# Altium footprint library SamacSys.PcbLib: 1008 footprints (part 14 of 63)
Each footprint in its own frame and in the unit in brackets; x right, y up, seen from the top. Pads: shape width x height; smd on the part's side, far side on the other; paste and mask are expansions set on the pad; w line width, h text height; cw(c..) or ccw(c..) is an arc to the next point about the centre after c.
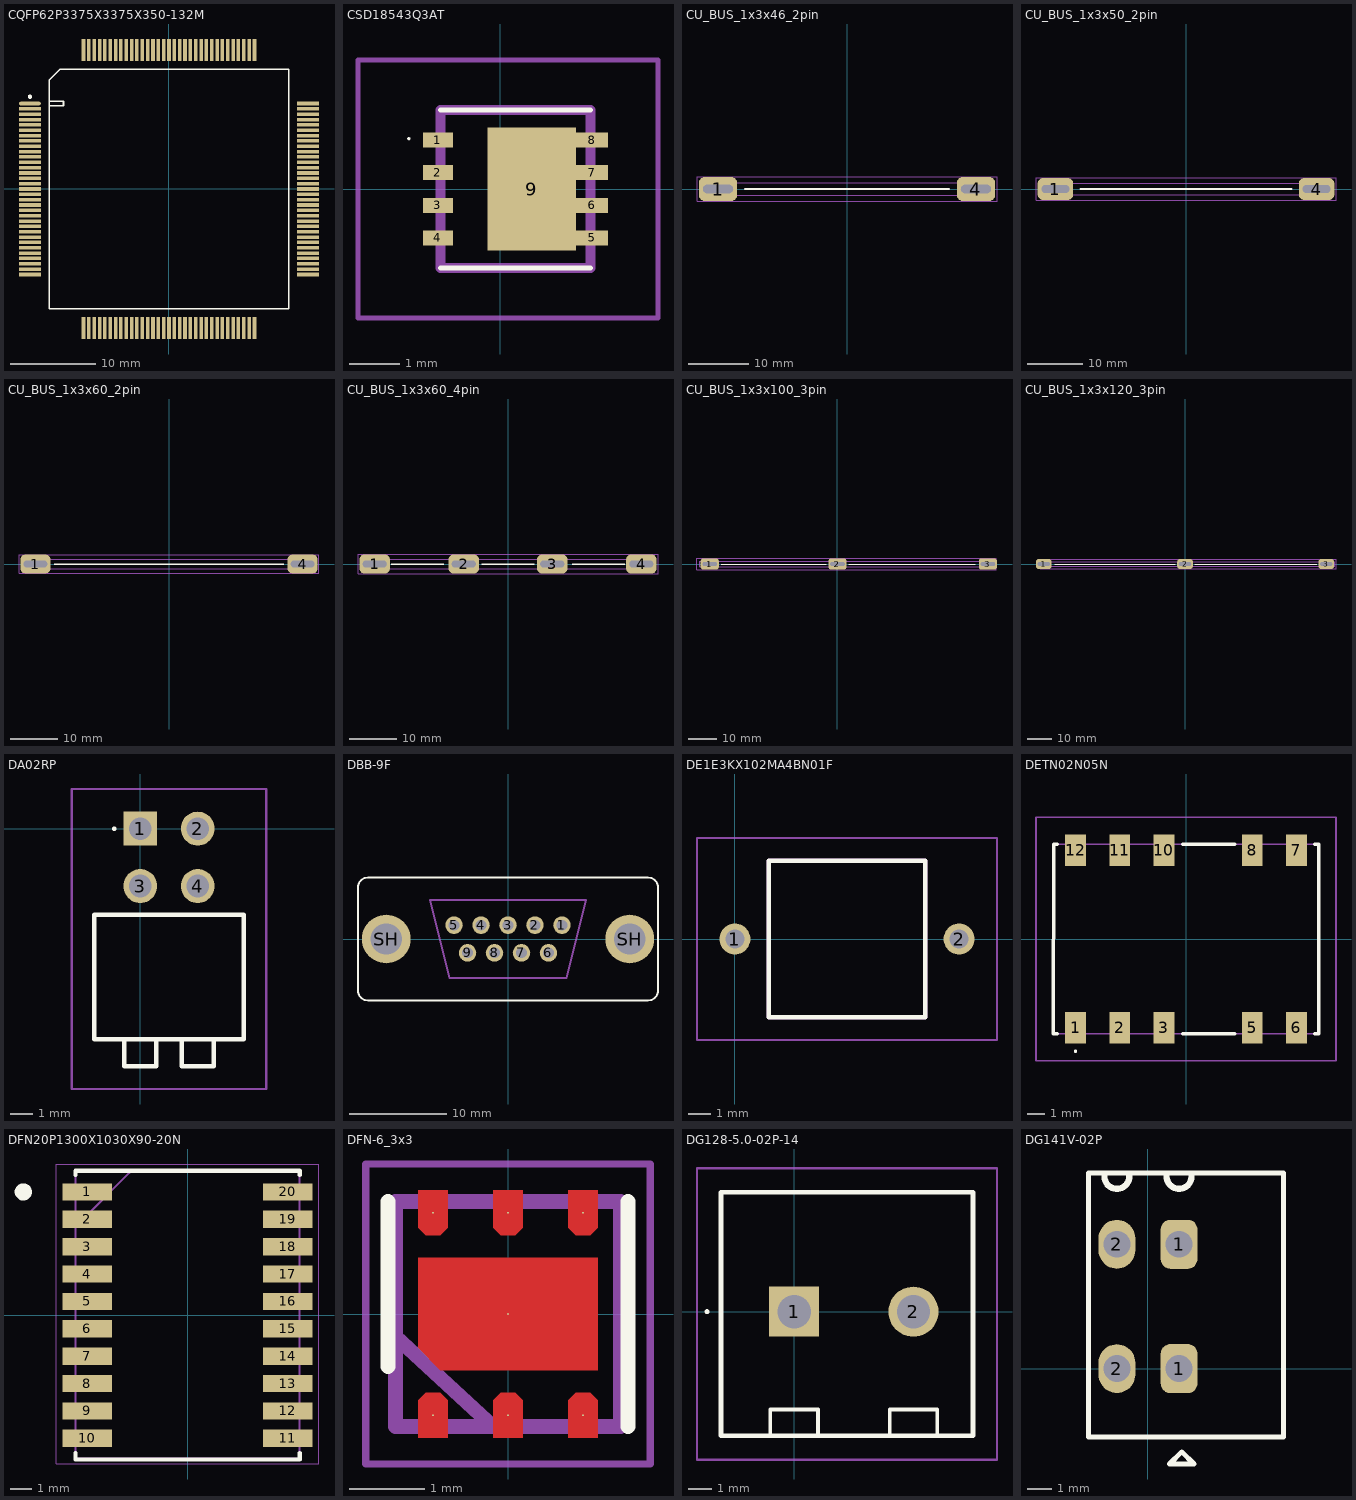
[diagram p13: the footprints below, top view; thin cyan lines are the x and y axes]

## CQFP62P3375X3375X350-132M [mm] "CQFP, 132-Leads, Body 33,75x33,75mm, Pitch 0,63mm, IPC Low Density"
height 3.5
pads (132):
  oval 2.55x0.42 smd: 1(-16.275,10)
  rect 2.55x0.42 smd: 2(-16.275,9.375) 3(-16.275,8.75) 4(-16.275,8.125) 5(-16.275,7.5) 6(-16.275,6.875) 7(-16.275,6.25) 8(-16.275,5.625) 9(-16.275,5) 10(-16.275,4.375) 11(-16.275,3.75) 12(-16.275,3.125) 13(-16.275,2.5) 14(-16.275,1.875) 15(-16.275,1.25) 16(-16.275,0.625) 17(-16.275,0) 18(-16.275,-0.625) 19(-16.275,-1.25) 20(-16.275,-1.875) 21(-16.275,-2.5) 22(-16.275,-3.125) 23(-16.275,-3.75) 24(-16.275,-4.375) 25(-16.275,-5) 26(-16.275,-5.625) 27(-16.275,-6.25) 28(-16.275,-6.875) 29(-16.275,-7.5) 30(-16.275,-8.125) 31(-16.275,-8.75) 32(-16.275,-9.375) 33(-16.275,-10) 67(16.275,-10) 68(16.275,-9.375) 69(16.275,-8.75) 70(16.275,-8.125) 71(16.275,-7.5) 72(16.275,-6.875) 73(16.275,-6.25) 74(16.275,-5.625) 75(16.275,-5) 76(16.275,-4.375) 77(16.275,-3.75) 78(16.275,-3.125) 79(16.275,-2.5) 80(16.275,-1.875) 81(16.275,-1.25) 82(16.275,-0.625) 83(16.275,0) 84(16.275,0.625) 85(16.275,1.25) 86(16.275,1.875) 87(16.275,2.5) 88(16.275,3.125) 89(16.275,3.75) 90(16.275,4.375) 91(16.275,5) 92(16.275,5.625) 93(16.275,6.25) 94(16.275,6.875) 95(16.275,7.5) 96(16.275,8.125) 97(16.275,8.75) 98(16.275,9.375) 99(16.275,10)
  rect 0.42x2.55 smd: 34(-10,-16.275) 35(-9.375,-16.275) 36(-8.75,-16.275) 37(-8.125,-16.275) 38(-7.5,-16.275) 39(-6.875,-16.275) 40(-6.25,-16.275) 41(-5.625,-16.275) 42(-5,-16.275) 43(-4.375,-16.275) 44(-3.75,-16.275) 45(-3.125,-16.275) 46(-2.5,-16.275) 47(-1.875,-16.275) 48(-1.25,-16.275) 49(-0.625,-16.275) 50(0,-16.275) 51(0.625,-16.275) 52(1.25,-16.275) 53(1.875,-16.275) 54(2.5,-16.275) 55(3.125,-16.275) 56(3.75,-16.275) 57(4.375,-16.275) 58(5,-16.275) 59(5.625,-16.275) 60(6.25,-16.275) 61(6.875,-16.275) 62(7.5,-16.275) 63(8.125,-16.275) 64(8.75,-16.275) 65(9.375,-16.275) 66(10,-16.275) 100(10,16.275) 101(9.375,16.275) 102(8.75,16.275) 103(8.125,16.275) 104(7.5,16.275) 105(6.875,16.275) 106(6.25,16.275) 107(5.625,16.275) 108(5,16.275) 109(4.375,16.275) 110(3.75,16.275) 111(3.125,16.275) 112(2.5,16.275) 113(1.875,16.275) 114(1.25,16.275) 115(0.625,16.275) 116(0,16.275) 117(-0.625,16.275) 118(-1.25,16.275) 119(-1.875,16.275) 120(-2.5,16.275) 121(-3.125,16.275) 122(-3.75,16.275) 123(-4.375,16.275) 124(-5,16.275) 125(-5.625,16.275) 126(-6.25,16.275) 127(-6.875,16.275) 128(-7.5,16.275) 129(-8.125,16.275) 130(-8.75,16.275) 131(-9.375,16.275) 132(-10,16.275)
Top Overlay:
  circle w0.25: c-16.275,10.8 r0.125
  lines w0.2: -14,9.75 -12.35,9.75 -12.35,10.25 -14,10.25 ; -14,-14 -14,12.75 -12.75,14 14,14 14,-14 -14,-14
3D body "Миландр. STEP-модель для корпуса 4229.132-3 формованный.STEP": height 3.55, standoff -0.1, extent -17.1,-17.1 17.1,17.1

## CSD18543Q3AT [mm]
pads (9):
  rect 0.6x0.3 smd: 1(-1.243,0.975) 2(-1.243,0.325) 3(-1.243,-0.325) 4(-1.243,-0.975)
  rect 0.635x0.3 smd: 5(1.839,-0.975) 6(1.839,-0.325) 7(1.839,0.325) 8(1.839,0.975)
  rect 1.775x2.45 smd: 9(0.634,0)
Top Overlay:
  lines w0.032: -1.839,1.006 cw(c-1.823,1.006) -1.807,1.006 cw(c-1.823,1.006) -1.839,1.006
  lines w0.1: -1.193,-1.575 1.807,-1.575 ; -1.193,1.575 1.807,1.575
Assembly:
  lines w0.2: -1.193,-1.575 -1.193,1.575 1.807,1.575 1.807,-1.575 -1.193,-1.575
Countryard:
  lines w0.1: -2.839,-2.575 -2.839,2.575 3.157,2.575 3.157,-2.575 -2.839,-2.575
3D body "CSD18543Q3AT.stp": height 1, standoff 0, extent -1.513,-1.575 2.127,1.575

## CU_BUS_1x3x46_2pin [mm] "Copper bus 1x3x46mm 2pin"
height 4
pads (2):
  rrect50% 6.4x4 hole 1.4 slot 5 at 0 deg: 1(-21.5,0) 4(21.5,0)
Top Overlay:
  lines w0.3: -17,0 17,0
Assembly:
  lines w0.1: -23,-1 23,-1 23,1 -23,1 -23,-1
Countryard:
  lines w0.1: -25,-2 25,-2 25,2 -25,2 -25,-2
3D body "bus_1x3x49_high_2pin.STEP": height 9.1, standoff -1.9, extent -24.5,-0.5 24.5,0.5

## CU_BUS_1x3x50_2pin [mm] "Copper bus 1x3x50mm 2pin"
height 4
pads (2):
  rrect50% 6.4x4 hole 1.4 slot 5 at 0 deg: 1(-23.5,0) 4(23.5,0)
Top Overlay:
  lines w0.3: -19,0 19,0
Assembly:
  lines w0.1: -25,-1 25,-1 25,1 -25,1 -25,-1
Countryard:
  lines w0.1: -27,-2 27,-2 27,2 -27,2 -27,-2

## CU_BUS_1x3x60_2pin [mm] "Copper bus 1x3x60mm 2pin"
height 4
pads (2):
  rrect50% 6.4x4 hole 1.4 slot 5 at 0 deg: 1(-28.5,0) 4(28.5,0)
Top Overlay:
  lines w0.3: -24.5,0 24.5,0
Assembly:
  lines w0.1: -30.5,-1 -30.5,1 31,1 31,-1 -30.5,-1
Countryard:
  lines w0.1: -32,-2 32,-2 32,2 -32,2 -32,-2
3D body "bus_1x3x60_2pin.STEP": height 3.5, standoff -1.5, extent -30.5,-0.5 30.5,0.5

## CU_BUS_1x3x60_4pin [mm] "Copper bus 1x60mm, 4 pin"
height 4
pads (4):
  rrect50% 6.4x4 hole 1.4 slot 5 at 0 deg: 1(-28,0) 2(-9.3,0) 3(9.3,0) 4(28,0)
Top Overlay:
  lines w0.3: -24.5,0 -13.5,0 ; -5.5,0 5.5,0 ; 13.5,0 24.5,0
Assembly:
  lines w0.1: -30.5,-1 -30.5,1 31,1 31,-1 -30.5,-1
Countryard:
  lines w0.1: -31.5,-2 31.5,-2 31.5,2 -31.5,2 -31.5,-2
3D body "bus_1x3x60_4pin.STEP": height 3.5, standoff -1.5, extent -30,-0.5 30,0.5

## CU_BUS_1x3x100_3pin [mm] "Copper bus 1x100mm, 3 pin"
height 4
pads (3):
  rrect50% 6.4x4 hole 1.4 slot 5 at 0 deg: 1(-45,0) 2(0,0) 3(53,0)
Top Overlay:
  lines w0.3: -41,0 -4,0 ; 4,0 48.5,0
Assembly:
  lines w0.1: 55.5,-1 -48.5,-1 -48.5,1 55.5,1 ; 56,-1 56,1
Countryard:
  lines w0.1: -49.5,-2 56,-2 56,2 -49.5,2 -49.5,-2
3D body "bus_1x3x100_3pin.STEP": height 5, standoff 0, extent -47,-0.5 55,0.5

## CU_BUS_1x3x120_3pin [mm] "Copper bus 1x120mm, 3 pin"
height 4
pads (3):
  rrect50% 6.4x4 hole 1.4 slot 5 at 0 deg: 1(-58,0) 2(0,0) 3(58,0)
Top Overlay:
  lines w0.3: -53.5,0 -4,0 ; 4,0 54,0
Assembly:
  lines w0.1: -58.5,-1 -58.5,1 61.5,1 61.5,-1 -58.5,-1
Countryard:
  lines w0.1: -59.5,-2 62,-2 62,2 -59.5,2 -59.5,-2
3D body "bus_1x3x60_4pin.STEP": height 3.5, standoff -1.5, extent -58,-0.5 2,0.5

## DA02RP [mm]
pads (4):
  rect 1.5x1.5 hole 1: 1(0,0)
  round 1.5 hole 1: 2(2.54,0) 3(0,-2.54) 4(2.54,-2.54)
Top Overlay:
  lines w0.1: -1.2,0 ccw(c-1.15,0) -1.1,0 ccw(c-1.15,0) -1.2,0
  lines w0.2: -0.7,-9.31 -0.7,-10.51 0.7,-10.51 0.7,-9.31 ; 1.84,-9.31 1.84,-10.51 3.24,-10.51 3.24,-9.31 ; -2.03,-9.31 4.57,-9.31 4.57,-3.81 -2.03,-3.81 -2.03,-9.31
Assembly:
  lines w0.1: -0.7,-9.31 -0.7,-10.51 0.7,-10.51 0.7,-9.31 ; 1.84,-9.31 1.84,-10.51 3.24,-10.51 3.24,-9.31 ; -2.03,-9.31 -2.03,-3.81 4.57,-3.81 4.57,-9.31 -2.03,-9.31
Countryard:
  lines w0.1: -3.03,-11.51 -3.03,1.75 5.57,1.75 5.57,-11.51 -3.03,-11.51
3D body "DA-02RP.stp": height 9.95, standoff -2.95, extent -2.03,-9.87 4.57,0.105

## DBB-9F [mm]
pads (11):
  round 1.8 hole 1.1: 1(5.54,1.42) 2(2.77,1.42) 3(0,1.42) 4(-2.77,1.42) 5(-5.54,1.42) 6(4.155,-1.42) 7(1.385,-1.42) 8(-1.385,-1.42) 9(-4.155,-1.42)
  round 5 hole 3.2: SH(-12.5,0) SH(12.5,0)
Top Overlay:
  lines w0.2: -15.4,-5.3 ccw(c-14.4,-5.3) -14.4,-6.3 14.4,-6.3 ccw(c14.4,-5.3) 15.4,-5.3 15.4,5.3 ccw(c14.4,5.3) 14.4,6.3 -14.4,6.3 ccw(c-14.4,5.3) -15.4,5.3 -15.4,-5.3
Top Assembly:
  lines w0.2: -8,4 -6,-4 6,-4 8,4 -8,4
3D body "User Library-DB-9F-2.step": height 13.4, standoff -1.7, extent -15.4,-6.25 15.4,6.25

## DE1E3KX102MA4BN01F [mm]
pads (2):
  round 1.381 hole 0.85: 1(0,0) 2(10,0)
Top Overlay:
  lines w0.2: 1.5,-3.5 1.5,3.5 8.5,3.5 8.5,-3.5 1.5,-3.5
Assembly:
  lines w0.2: 1.5,-3.5 1.5,3.5 8.5,3.5 8.5,-3.5 1.5,-3.5
Countryard:
  lines w0.1: -1.691,-4.5 -1.691,4.5 11.691,4.5 11.691,-4.5 -1.691,-4.5
3D body "DE1E3KX102MA4BN01F.stp": height 10.1, standoff -5, extent -0.322,-3.5 10.325,3.5

## DETN02N05N [mm]
pads (10):
  rect 1.2x1.8 smd: 1(-6.35,-5.1) 2(-3.81,-5.1) 3(-1.27,-5.1) 5(3.81,-5.1) 6(6.35,-5.1) 7(6.35,5.1) 8(3.81,5.1) 10(-1.27,5.1) 11(-3.81,5.1) 12(-6.35,5.1)
Top Overlay:
  lines w0.1: -6.35,-6.5 ccw(c-6.35,-6.45) -6.35,-6.4 ccw(c-6.35,-6.45) -6.35,-6.5
  lines w0.2: -7.4,-5.45 -7.62,-5.45 -7.6,5.45 -7.4,5.45 ; -0.2,-5.45 2.8,-5.45 ; -0.2,5.45 2.8,5.45 ; 7.4,-5.45 7.62,-5.45 7.62,5.45 7.4,5.45
Assembly:
  lines w0.1: -7.62,-5.45 7.62,-5.45 7.62,5.45 -7.62,5.45 -7.62,-5.45
Countryard:
  lines w0.1: -8.62,-7 8.62,-7 8.62,7 -8.62,7 -8.62,-7
3D body "DETN02N-05N.stp": height 9.7, standoff 0, extent -7.62,-5.88 7.62,5.88

## DFN20P1300X1030X90-20N [mm]
pads (20):
  rect 2.3x0.8 smd: 1(-4.65,5.715) 2(-4.65,4.445) 3(-4.65,3.175) 4(-4.65,1.905) 5(-4.65,0.635) 6(-4.65,-0.635) 7(-4.65,-1.905) 8(-4.65,-3.175) 9(-4.65,-4.445) 10(-4.65,-5.715) 11(4.65,-5.715) 12(4.65,-4.445) 13(4.65,-3.175) 14(4.65,-1.905) 15(4.65,-0.635) 16(4.65,0.635) 17(4.65,1.905) 18(4.65,3.175) 19(4.65,4.445) 20(4.65,5.715)
Top Overlay:
  circle w0.4: c-7.62,5.715 r0.2
  lines w0.2: -5.2,-6.4 -5.2,-6.7 5.2,-6.7 5.2,-6.4 ; -5.2,6.5 -5.2,6.7 -3,6.7 3.1,6.7 5.2,6.7 5.2,6.5
Assembly:
  lines w0.1: -5.1,4.2 -2.7,6.6 ; -5.2,-6.65 -5.2,6.65 5.2,6.65 5.2,-6.65 -5.2,-6.65
Countryard:
  lines w0.05: -6.1,-6.9 6.1,-6.9 6.1,7 -6.1,7 -6.1,-6.9
3D body: height 3.1, standoff 0, extent -5.2,-6.6 5.2,6.6

## DFN-6_3x3 [mil]
pads (7):
  round 1 smd: 1(-39.37,-53.15) 2(0,-53.15) 3(39.37,-53.15) 4(39.37,53.15) 5(0,53.15) 6(-39.37,53.15) 7(0,0)
Top Layer:
  region: -35.43,-29.53 -47.24,-17.72 -47.24,29.53 47.24,29.53 47.24,-29.53
  region: -47.24,45.28 -47.24,64.96 -31.5,64.96 -31.5,45.28 -35.43,41.34 -43.31,41.34
  region: -7.87,45.28 -7.87,64.96 7.87,64.96 7.87,45.28 3.94,41.34 -3.94,41.34
  region: 31.5,45.28 31.5,64.96 47.24,64.96 47.24,45.28 43.31,41.34 35.43,41.34
  region: 47.24,-45.28 47.24,-64.96 31.5,-64.96 31.5,-45.28 35.43,-41.34 43.31,-41.34
  region: 7.87,-45.28 7.87,-64.96 -7.87,-64.96 -7.87,-45.28 -3.94,-41.34 3.94,-41.34
  region: -31.5,-45.28 -31.5,-64.96 -47.24,-64.96 -47.24,-45.28 -43.31,-41.34 -35.43,-41.34
Top Overlay:
  lines w7.87: -62.99,-27.56 -62.99,59.06 ; 62.99,-59.06 62.99,59.05
  text "." at -48.77,-92.08 h157.48
Assembly:
  lines w7.87: -59.06,-11.81 -7.87,-59.06 ; -59.06,-59.06 59.06,-59.06 59.06,59.06 -59.06,59.06 -59.06,-59.06
Countryard:
  lines w3.94: -74.8,-78.74 -74.8,78.74 74.8,78.74 74.8,-78.74 -74.8,-78.74
3D body "Sensirion_Humidity_SHT2x-STEP-file.STEP": height 43.31, standoff 0, extent -59.06,-59.06 59.06,59.06

## DG128-5.0-02P-14 [mm]
pads (2):
  rect 2.1x2.1 hole 1.4: 1(0,0)
  round 2.1 hole 1.4: 2(5,0)
Top Overlay:
  lines w0.1: -3.7,0 cw(c-3.65,0) -3.6,0 cw(c-3.65,0) -3.7,0
  lines w0.15: -1,-5.1 -1,-4.1 1,-4.1 1,-5.1 ; 4,-5.1 4,-4.1 6,-4.1 6,-5.1
  lines w0.2: -3.07,-5.2 7.5,-5.2 7.5,5 -3.07,5 -3.07,-5.2
Assembly:
  lines w0.1: -3.07,-5.2 7.5,-5.2 7.5,5 -3.07,5 -3.07,-5.2
Countryard:
  lines w0.1: -4.07,-6.2 8.5,-6.2 8.5,6 -4.07,6 -4.07,-6.2
3D body "DG128-5.0-02P-14-1000A(H).stp": height 14, standoff -3.5, extent -3.035,-5.2 7.535,5

## DG141V-02P [mm]
height 14
pads (4):
  rrect50% 1.5x2 hole 1.1: 1(1.27,0) 1(1.27,5.08)
  oval 1.5x2 hole 1.1: 2(-1.27,0) 2(-1.27,5.08)
Top Overlay:
  lines w0.2: -2.424,-2.8 5.53,-2.8 5.53,8 -2.424,8 -2.424,-2.8 ; 0.88,-3.897 1.38,-3.397 1.88,-3.897 0.88,-3.897
  lines w0.254: -1.778,7.852 ccw(c-1.27,7.852) -0.762,7.852 ; 0.762,7.852 ccw(c1.27,7.852) 1.778,7.852
Countryard:
  lines w0.1: -2.424,7.9 -2.424,-2.8 5.53,-2.8 5.53,8 ; -2.424,7.951 5.53,7.951
3D body "DG141V-2.54-02P-1Y-00A(H).stp": height 13.6, standoff -3.5, extent -2.159,-2.871 5.461,9.729